# Altium footprint library RES_WSL25122L000FEA.PcbLib: 1 footprints
Each footprint in its own frame and in the unit in brackets; x right, y up, seen from the top. Pads: shape width x height; smd on the part's side, far side on the other; paste and mask are expansions set on the pad; w line width, h text height; cw(c..) or ccw(c..) is an arc to the next point about the centre after c.
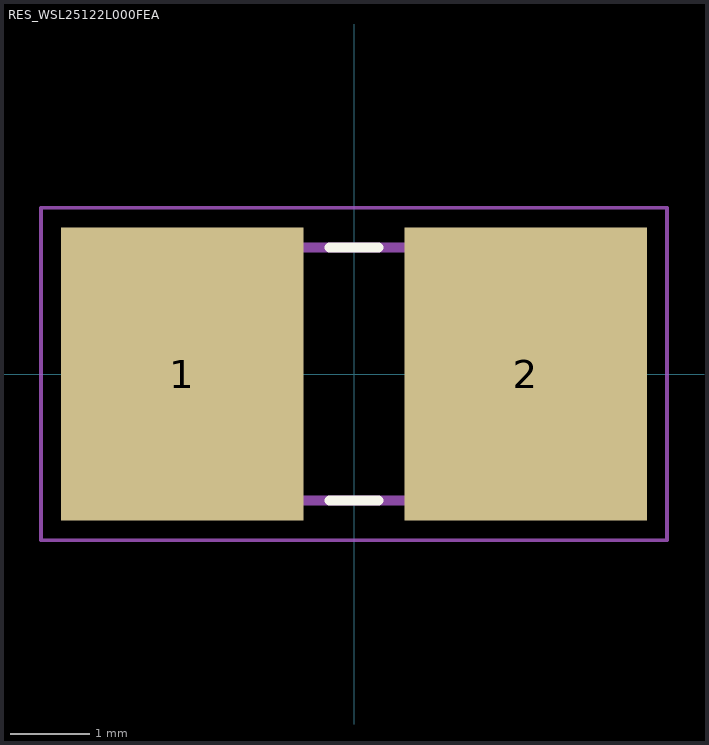
[diagram p0: the footprint, top view; thin cyan lines are the x and y axes]

## RES_WSL25122L000FEA [mm]
height 0.889
pads (2):
  rect 3.05x3.68 smd: 1(-2.16,0) 2(2.16,0)
Top Overlay:
  lines w0.127: -0.31,-1.59 0.31,-1.59 ; -0.31,1.59 0.31,1.59
Mechanical 13:
  lines w0.127: -3.175,-1.59 3.175,-1.59 3.175,1.59 -3.175,1.59 -3.175,-1.59
Mechanical 15:
  lines w0.05: -3.935,-2.09 3.935,-2.09 3.935,2.09 -3.935,2.09 -3.935,-2.09